# Altium footprint library Library_Mecatronica.PcbLib: 20 footprints (part 1 of 2)
Each footprint in its own frame and in the unit in brackets; x right, y up, seen from the top. Pads: shape width x height; smd on the part's side, far side on the other; paste and mask are expansions set on the pad; w line width, h text height; cw(c..) or ccw(c..) is an arc to the next point about the centre after c.
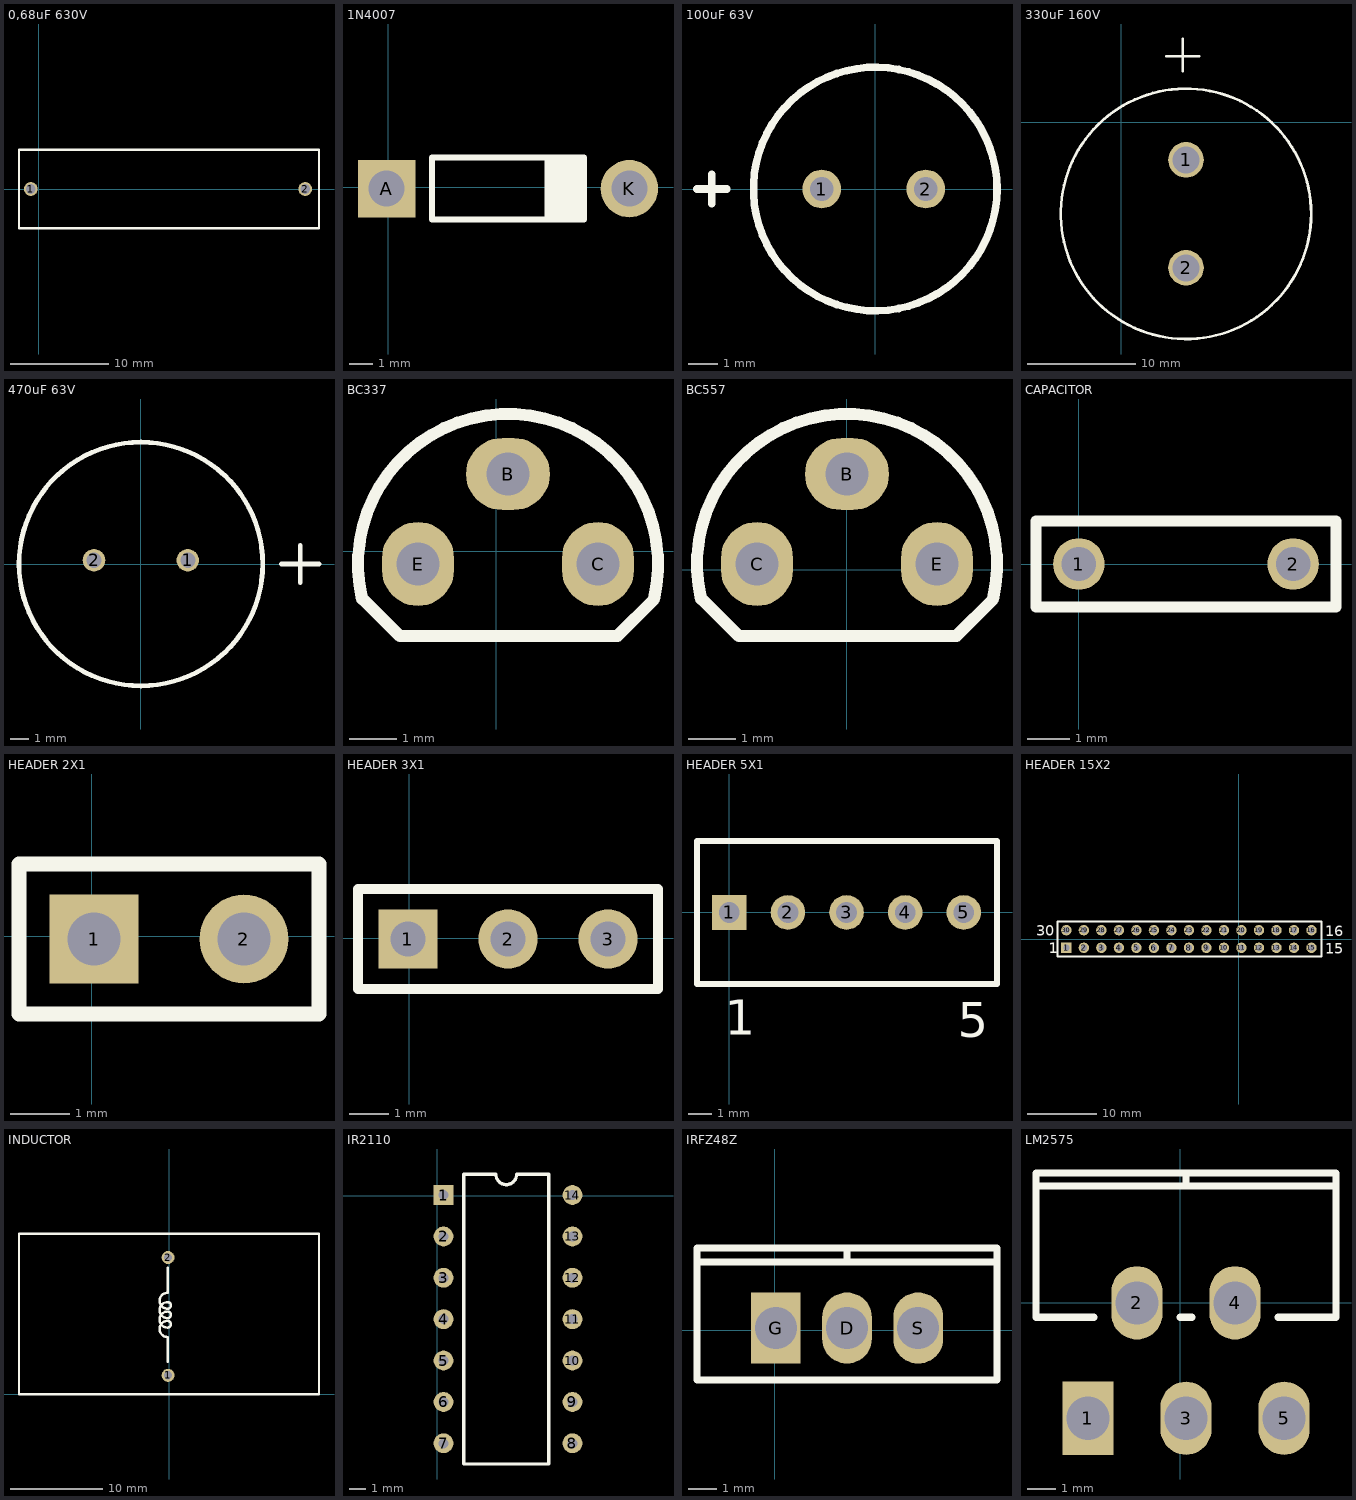
[diagram p0: the footprints below, top view; thin cyan lines are the x and y axes]

## 0,68uF 630V [mm]
pads (2):
  round 1.4 hole 1: 1(-0.8,0) 2(27.1,0)
Top Overlay:
  lines w0.254: -2,-4 -2,4 28.5,4 28.5,-4 -2,-4
3D body "User Library-Capacitor-4.STEP": height 16.03, standoff -3.26, extent -1.16,-3.7 27.5,3.7

## 1N4007 [mm] "RECTIFIER DIODE 700V/1A"
pads (2):
  rect 2.4x2.4 hole 1.5: A(-0.057,-0.055)
  round 2.4 hole 1.5: K(10.103,-0.055)
Top Overlay:
  rectangle: 6.547,-1.385 8.198,1.215
  lines w0.254: 1.848,-1.355 1.848,1.245 8.198,1.245 8.198,-1.355 1.848,-1.355
3D body "DO-41-PLASTIC.STEP": height 2.84, standoff -2.51, extent -0.438,-1.452 10.582,1.248

## 100uF 63V [mm]
pads (2):
  round 1.3 hole 0.8: 1(-1.8,0) 2(1.7,0)
Top Overlay:
  circle w0.254: c0,0 r4.1
  lines w0.254: -6,0 -5,0 ; -5.5,-0.5 -5.5,0.5
3D body "User Library-Cap-EL(8x11_5-3_5).STEP": height 11.5, standoff -3.3, extent -4,-3.991 4.002,3.991

## 330uF 160V [mm] "ELETROLYTICAL CAPACITOR"
pads (2):
  round 3.3 hole 2.5: 1(6,-3.5) 2(6,-13.5)
Top Overlay:
  circle w0.254: c6,-8.5 r11.6
  lines w0.254: 4.2,6.1 7.2,6.1 ; 5.7,4.7 5.7,7.7
3D body "User Library-Assy_CE_R400_D1200_H1450.STEP": height 38.83, standoff -4.89, extent -9.299,-23.677 21.174,6.803

## 470uF 63V [mm] "ELETROLYTICAL CAPACITOR 470uF 63V"
pads (2):
  round 1.2 hole 0.8: 1(2.5,0.2) 2(-2.5,0.2)
Top Overlay:
  circle w0.254: c0,0 r6.5
  lines w0.254: 7.5,0 9.5,0 ; 8.5,-1 8.5,1
3D body "User Library-Cap12_5x25.STEP": height 28.49, standoff -15.5, extent -6.25,-6 6.25,6.5

## BC337 [mil] "TRANSISTOR NPN BC337"
pads (3):
  oval 70x60 hole 35.43: B(9.81,64.52)
  oval 60x70 hole 35.43: C(84.81,-10.48) E(-65.19,-10.48)
Top Overlay:
  lines w10: -111.74,-39.65 cw(c9.81,-10.48) 131.36,-39.65 ; -111.44,-39.35 -80.31,-70.48 100.92,-70.48 131.55,-39.85
3D body "User Library-TO-92-5.STEP": height 238.98, standoff -77.56, extent -102,-60.48 121.62,89.13

## BC557 [mil] "PNP TRANSISTOR TO-92"
pads (3):
  oval 70x60 hole 35.43: B(0.41,79.69)
  oval 60x70 hole 35.43: C(-74.59,4.68) E(75.41,4.68)
Top Overlay:
  lines w10: -121.14,-24.49 cw(c0.41,4.68) 121.96,-24.49 ; -120.84,-24.19 -89.71,-55.31 91.52,-55.31 122.15,-24.68
3D body "User Library-TO-92-5.STEP": height 238.98, standoff -77.56, extent -111.4,-45.31 112.22,104.29

## CAPACITOR [mm] "GENERIC POLYESTER CAPACITOR"
pads (2):
  round 1.2 hole 0.8: 1(0,0) 2(5,0)
Top Overlay:
  lines w0.254: -1,-1 6,-1 6,1 -1,1 -1,-1
3D body "User Library-MKT_B32529.STEP": height 7.5, standoff -5, extent -1.15,-1.5 6.15,1.5

## HEADER 2X1 [mm]
pads (2):
  rect 1.5x1.5 hole 0.9: 1(0.039,-0.044)
  round 1.5 hole 0.9: 2(2.579,-0.044)
Top Overlay:
  lines w0.254: -1.231,-1.314 -1.231,1.226 3.849,1.226 3.849,-1.314 -1.231,-1.314
3D body "HDR-M-1x2-2.54mm-180-11.6mm.stp": height 8.6, standoff -3, extent -1.129,-1.268 3.951,1.231

## HEADER 3X1 [mm]
pads (3):
  rect 1.5x1.5 hole 0.9: 1(-0.031,-0.025)
  round 1.5 hole 0.9: 2(2.509,-0.025) 3(5.049,-0.025)
Top Overlay:
  lines w0.254: -1.301,-1.295 6.319,-1.295 6.319,1.245 -1.301,1.245 -1.301,-1.295
3D body "HDR-M-1x3-2.54mm-180-11.6mm.stp": height 8.6, standoff -3, extent -1.199,-1.249 6.421,1.25

## HEADER 5X1 [mm]
pads (5):
  rect 1.5x1.5 hole 0.9: 1(0,0)
  round 1.5 hole 0.9: 2(2.54,0) 3(5.08,0) 4(7.62,0) 5(10.16,0)
Top Overlay:
  lines w0.254: -1.4,-3.1 -1.4,3.1 11.6,3.1 11.6,-3.1 -1.4,-3.1
  text "5" at 9.9,-5.4 h1.52
  text "1" at -0.2,-5.3 h1.52
3D body "SW3dPS-molex kk 0_1in latching 5 way vertical header.STEP": height 12.1, standoff -3.14, extent -1.25,-2.942 11.45,2.9

## HEADER 15X2 [mm]
pads (30):
  rect 1.5x1.5 hole 0.9: 1(-24.996,-1.212)
  round 1.5 hole 0.9: 2(-22.456,-1.212) 3(-19.916,-1.212) 4(-17.376,-1.212) 5(-14.836,-1.212) 6(-12.296,-1.212) 7(-9.756,-1.212) 8(-7.216,-1.212) 9(-4.676,-1.212) 10(-2.136,-1.212) 11(0.404,-1.212) 12(2.944,-1.212) 13(5.484,-1.212) 14(8.024,-1.212) 15(10.564,-1.212) 16(10.564,1.328) 17(8.024,1.328) 18(5.484,1.328) 19(2.944,1.328) 20(0.404,1.328) 21(-2.136,1.328) 22(-4.676,1.328) 23(-7.216,1.328) 24(-9.756,1.328) 25(-12.296,1.328) 26(-14.836,1.328) 27(-17.376,1.328) 28(-19.916,1.328) 29(-22.456,1.328) 30(-24.996,1.328)
Top Overlay:
  lines w0.254: -26.266,-2.482 -26.266,2.598 12,2.598 12,-2.482 -26.266,-2.482
  text "30" at -29.4,0.5 h1.52
  text "15" at 12.596,-2.074 h1.52
  text "16" at 12.596,0.466 h1.52
  text "1" at -27.536,-1.974 h1.52
3D body "User Library-IDC6.STEP": height 8.5, standoff -2.5, extent -3.35,-2.58 4.27,2.5
3D body "User Library-IDC6.STEP": height 8.5, standoff -2.5, extent 4.27,-2.58 11.89,2.5
3D body "User Library-IDC6.STEP": height 8.5, standoff -2.5, extent -10.97,-2.58 -3.35,2.5
3D body "User Library-IDC6.STEP": height 8.5, standoff -2.5, extent -18.59,-2.58 -10.97,2.5
3D body "User Library-IDC6.STEP": height 8.5, standoff -2.5, extent -26.21,-2.58 -18.59,2.5

## INDUCTOR [mm]
pads (2):
  round 1.4 hole 0.9: 1(-0.1,2.025) 2(-0.1,14.75)
Top Overlay:
  lines w0.254: -0.136,7.902 cw(c-0.149,7.543) -0.134,7.183 ; -0.136,8.918 cw(c-0.149,8.559) -0.134,8.2 ; -0.136,9.934 cw(c-0.149,9.575) -0.134,9.216 ; -0.132,7.901 ccw(c-0.149,7.034) -0.131,6.168 ; -0.132,8.918 ccw(c-0.149,8.051) -0.131,7.184 ; -0.132,9.934 ccw(c-0.149,9.067) -0.131,8.2 ; -0.132,10.95 ccw(c-0.149,10.083) -0.131,9.216 ; -0.128,3.499 -0.128,6.039 ; -0.128,11.121 -0.128,13.661 ; -16.2,0 16.2,0 16.2,17.3 -16.2,17.3 -16.2,0
3D body "Triad Magnetics-FIT106-2.STEP": height 1.81, standoff -34.51, extent -15.975,-0.49 15.775,17.29

## IR2110 [mm] "DIP-14"
pads (14):
  rect 1.2x1.2 hole 0.6: 1(0.38,0.031)
  round 1.2 hole 0.6: 2(0.38,-2.469) 3(0.38,-4.969) 4(0.38,-7.469) 5(0.38,-9.969) 6(0.38,-12.469) 7(0.38,-14.969) 8(8.173,-14.969) 9(8.173,-12.469) 10(8.173,-9.969) 11(8.173,-7.469) 12(8.173,-4.969) 13(8.173,-2.469) 14(8.173,0.031)
Top Overlay:
  lines w0.2: 1.608,-16.219 6.738,-16.219 6.738,1.281 4.798,1.281 cw(c4.173,1.281) 3.548,1.281 1.608,1.281 1.608,-16.219
3D body "SW3DPS-DIP-14-DEFAULT.STEP": height 5.32, standoff -1.66, extent 0.318,-17.018 8.318,2.032

## IRFZ48Z [mm] "IRFZ48Z 55V/11A"
pads (3):
  oval 1.778x2.54 hole 1.5: D(2.569,0.083) S(5.109,0.083)
  rect 1.778x2.54 hole 1.5: G(0.029,0.083)
Top Overlay:
  lines w0.254: -2.781,2.433 7.919,2.433 ; 2.569,2.433 2.569,2.933 ; -2.781,-1.767 -2.781,2.933 7.919,2.933 7.919,-1.767 -2.781,-1.767
3D body "TO220.step": height 21.13, standoff -8.2, extent -3.038,-1.407 8.175,3.283

## LM2575 [mm]
pads (5):
  rect 1.778x2.54 hole 1.5: 1(-3.201,-4.002)
  oval 1.778x2.54 hole 1.5: 2(-1.501,-0.002) 3(0.199,-4.002) 4(1.899,-0.002) 5(3.599,-4.002)
Top Overlay:
  lines w0.254: -5.001,4.048 5.399,4.048 ; -3.001,-0.502 -5.001,-0.502 -5.001,4.498 5.399,4.498 5.399,-0.502 3.399,-0.502 ; -0.001,-0.502 0.399,-0.502 ; 0.199,4.048 0.199,4.498
3D body "TO-220-5.step": height 21.35, standoff -2.64, extent -4.881,-4.002 5.279,4.238